# Altium footprint library SamacSys.PcbLib: 70 footprints (part 3 of 5)
Each footprint in its own frame and in the unit in brackets; x right, y up, seen from the top. Pads: shape width x height; smd on the part's side, far side on the other; paste and mask are expansions set on the pad; w line width, h text height; cw(c..) or ccw(c..) is an arc to the next point about the centre after c.
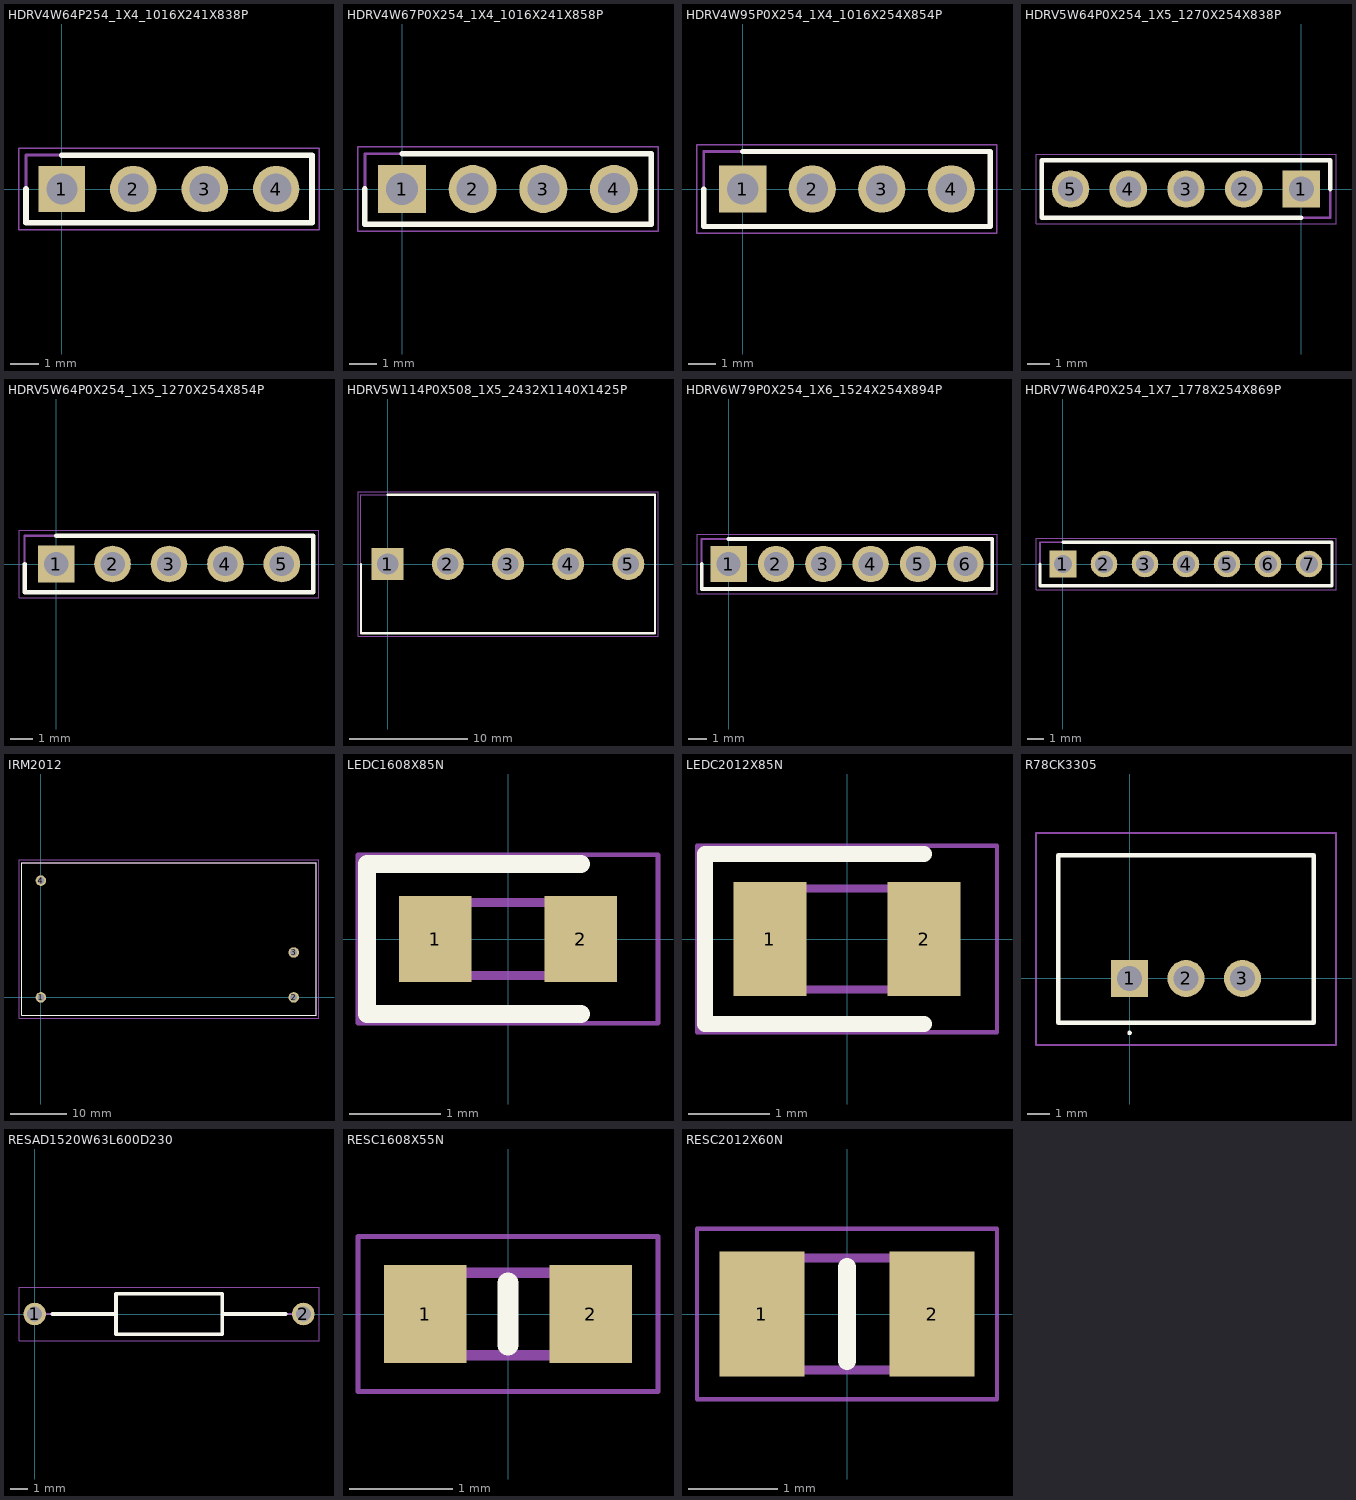
[diagram p2: the footprints below, top view; thin cyan lines are the x and y axes]

## HDRV4W64P254_1X4_1016X241X838P [mm]
pads (4):
  rect 1.65x1.65 hole 1.1: 1(0,0)
  round 1.65 hole 1.1: 2(2.54,0) 3(5.08,0) 4(7.62,0)
Top Overlay:
  lines w0.2: -1.27,0 -1.27,-1.205 8.89,-1.205 8.89,1.205 0,1.205
Mechanical 13:
  lines w0.1: -1.27,-1.205 8.89,-1.205 8.89,1.205 -1.27,1.205 -1.27,-1.205
Mechanical 15:
  lines w0.05: -1.52,-1.455 9.14,-1.455 9.14,1.455 -1.52,1.455 -1.52,-1.455
3D body "TSW-104-07-G-S-LL.stp": height 8.38, standoff -2.54, extent -1.27,-1.205 8.89,1.205

## HDRV4W67P0X254_1X4_1016X241X858P [mm]
pads (4):
  rect 1.725x1.725 hole 1.15: 1(0,0)
  round 1.725 hole 1.15: 2(2.54,0) 3(5.08,0) 4(7.62,0)
Top Overlay:
  lines w0.2: -1.335,0 -1.335,-1.27 8.955,-1.27 8.955,1.27 0,1.27
Mechanical 13:
  lines w0.1: -1.335,-1.27 8.955,-1.27 8.955,1.27 -1.335,1.27 -1.335,-1.27
Mechanical 15:
  lines w0.05: -1.585,-1.52 9.205,-1.52 9.205,1.52 -1.585,1.52 -1.585,-1.52
3D body "69190-404HLF.stp": height 8.58, standoff -3.3, extent -1.27,-1.205 8.89,1.205

## HDRV4W95P0X254_1X4_1016X254X854P [mm]
pads (4):
  rect 1.725x1.725 hole 1.15: 1(0,0)
  round 1.725 hole 1.15: 2(2.54,0) 3(5.08,0) 4(7.62,0)
Top Overlay:
  lines w0.2: -1.42,0 -1.42,-1.37 9.04,-1.37 9.04,1.37 0,1.37
Mechanical 13:
  lines w0.1: -1.42,-1.37 9.04,-1.37 9.04,1.37 -1.42,1.37 -1.42,-1.37
Mechanical 15:
  lines w0.05: -1.67,-1.62 9.29,-1.62 9.29,1.62 -1.67,1.62 -1.67,-1.62
3D body "61300411121.stp": height 8.54, standoff -3.2, extent -1.27,-1.27 8.89,1.27

## HDRV5W64P0X254_1X5_1270X254X838P [mm]
pads (5):
  rect 1.65x1.65 hole 1.1: 1(0,0)
  round 1.65 hole 1.1: 2(-2.54,0) 3(-5.08,0) 4(-7.62,0) 5(-10.16,0)
Top Overlay:
  lines w0.2: 0,-1.27 -11.43,-1.27 -11.43,1.27 1.27,1.27 1.27,0
Mechanical 13:
  lines w0.1: -11.43,-1.27 -11.43,1.27 1.27,1.27 1.27,-1.27 -11.43,-1.27
Mechanical 15:
  lines w0.05: -11.68,-1.52 -11.68,1.52 1.52,1.52 1.52,-1.52 -11.68,-1.52
3D body "TSW-105-07-G-S-LL.stp": height 8.38, standoff -2.54, extent -11.43,-1.27 1.27,1.27

## HDRV5W64P0X254_1X5_1270X254X854P [mm]
pads (5):
  rect 1.65x1.65 hole 1.1: 1(0,0)
  round 1.65 hole 1.1: 2(2.54,0) 3(5.08,0) 4(7.62,0) 5(10.16,0)
Top Overlay:
  lines w0.2: -1.42,0 -1.42,-1.27 11.58,-1.27 11.58,1.27 0,1.27
Mechanical 13:
  lines w0.1: -1.42,-1.27 11.58,-1.27 11.58,1.27 -1.42,1.27 -1.42,-1.27
Mechanical 15:
  lines w0.05: -1.67,-1.52 11.83,-1.52 11.83,1.52 -1.67,1.52 -1.67,-1.52
3D body "61300511121.stp": height 8.54, standoff -3, extent -1.27,-1.27 11.43,1.27

## HDRV5W114P0X508_1X5_2432X1140X1425P [mm]
pads (5):
  rect 2.7x2.7 hole 1.8: 1(0,0)
  round 2.7 hole 1.8: 2(5.08,0) 3(10.16,0) 4(15.24,0) 5(20.32,0)
Top Overlay:
  lines w0.2: -2.25,0 -2.25,-5.85 22.57,-5.85 22.57,5.85 0,5.85
Mechanical 13:
  lines w0.1: -2.25,-5.85 22.57,-5.85 22.57,5.85 -2.25,5.85 -2.25,-5.85
Mechanical 15:
  lines w0.05: -2.5,-6.1 22.82,-6.1 22.82,6.1 -2.5,6.1 -2.5,-6.1
3D body "10-32-1051.stp": height 13.8, standoff -3.65, extent -2,-5.7 22.32,5.7

## HDRV6W79P0X254_1X6_1524X254X894P [mm]
pads (6):
  rect 1.95x1.95 hole 1.3: 1(0,0)
  round 1.95 hole 1.3: 2(2.54,0) 3(5.08,0) 4(7.62,0) 5(10.16,0) 6(12.7,0)
Top Overlay:
  lines w0.2: -1.445,0 -1.445,-1.345 14.145,-1.345 14.145,1.345 0,1.345
Mechanical 13:
  lines w0.1: -1.445,-1.345 14.145,-1.345 14.145,1.345 -1.445,1.345 -1.445,-1.345
Mechanical 15:
  lines w0.05: -1.695,-1.595 14.395,-1.595 14.395,1.595 -1.695,1.595 -1.695,-1.595
3D body "61300611121.stp": height 8.54, standoff -3, extent -1.27,-1.27 13.97,1.27

## HDRV7W64P0X254_1X7_1778X254X869P [mm]
pads (7):
  rect 1.65x1.65 hole 1.1: 1(0,0)
  round 1.65 hole 1.1: 2(2.54,0) 3(5.08,0) 4(7.62,0) 5(10.16,0) 6(12.7,0) 7(15.24,0)
Top Overlay:
  lines w0.2: -1.42,0 -1.42,-1.345 16.66,-1.345 16.66,1.345 0,1.345
Mechanical 13:
  lines w0.1: -1.42,-1.345 16.66,-1.345 16.66,1.345 -1.42,1.345 -1.42,-1.345
Mechanical 15:
  lines w0.05: -1.67,-1.595 16.91,-1.595 16.91,1.595 -1.67,1.595 -1.67,-1.595
3D body "61300711121.stp": height 8.69, standoff -3.2, extent -1.27,-1.27 16.51,1.27

## IRM2012 [mm]
pads (4):
  round 1.86 hole 1.24: 1(0,0) 2(45,0) 3(45,8) 4(0,20.8)
Top Overlay:
  lines w0.1: -3.4,-3.2 -3.4,24 49,24 49,-3.2 -3.4,-3.2
Mechanical 13:
  lines w0.2: -3.4,-3.2 -3.4,24 49,24 49,-3.2 -3.4,-3.2
Mechanical 15:
  lines w0.1: -3.9,-3.7 -3.9,24.5 49.5,24.5 49.5,-3.7 -3.9,-3.7
3D body "IRM-20-12.stp": height 24, standoff -3.5, extent -3.42,-3.2 48.98,24

## LEDC1608X85N [mm]
pads (2):
  rect 0.8x0.95 smd: 1(-0.8,0) 2(0.8,0)
Top Overlay:
  lines w0.2: 0.8,-0.825 -1.55,-0.825 -1.55,0.825 0.8,0.825
Mechanical 13:
  lines w0.1: -0.8,0.133 -0.533,0.4 ; -0.8,-0.4 -0.8,0.4 0.8,0.4 0.8,-0.4 -0.8,-0.4
Mechanical 15:
  lines w0.05: -1.65,-0.925 -1.65,0.925 1.65,0.925 1.65,-0.925 -1.65,-0.925
3D body "APT1608SGC.stp": height 0.76, standoff 0, extent -0.8,-0.4 0.8,0.4

## LEDC2012X85N [mm]
pads (2):
  rect 0.9x1.4 smd: 1(-0.95,0) 2(0.95,0)
Top Overlay:
  lines w0.2: 0.95,-1.05 -1.75,-1.05 -1.75,1.05 0.95,1.05
Mechanical 13:
  lines w0.1: -1,0.208 -0.583,0.625 ; -1,-0.625 -1,0.625 1,0.625 1,-0.625 -1,-0.625
Mechanical 15:
  lines w0.05: -1.85,-1.15 -1.85,1.15 1.85,1.15 1.85,-1.15 -1.85,-1.15
3D body "APT2012SGC.stp": height 0.75, standoff 0, extent -1.03,-0.625 0.97,0.625

## PCBComponent_1 [mm]

## R78CK3305 [mm]
pads (3):
  rect 1.665x1.665 hole 1.11: 1(0,0)
  round 1.665 hole 1.11: 2(2.54,0) 3(5.08,0)
Top Overlay:
  lines w0.1: 0,-2.5 ccw(c0,-2.45) 0,-2.4 ccw(c0,-2.45) 0,-2.5
  lines w0.2: -3.21,-2 8.29,-2 8.29,5.55 -3.21,5.55 -3.21,-2
Mechanical 13:
  lines w0.1: -3.21,-2 -3.21,5.55 8.29,5.55 8.29,-2 -3.21,-2
Mechanical 15:
  lines w0.1: -4.21,-3 -4.21,6.55 9.29,6.55 9.29,-3 -4.21,-3
3D body "R-78CK3.3-0.5.stp": height 10.43, standoff -3.87, extent -3.21,-1.995 8.29,5.555

## RESAD1520W63L600D230 [mm]
pads (2):
  round 1.275 hole 0.85: 1(0,0) 2(15.2,0)
Top Overlay:
  lines w0.2: 0.988,0 4.6,0 ; 10.6,0 14.212,0 ; 4.6,-1.15 4.6,1.15 10.6,1.15 10.6,-1.15 4.6,-1.15
Mechanical 13:
  lines w0.1: 0,0 4.6,0 ; 10.6,0 15.2,0 ; 4.6,-1.15 4.6,1.15 10.6,1.15 10.6,-1.15 4.6,-1.15
Mechanical 15:
  lines w0.05: -0.888,-1.5 -0.888,1.5 16.087,1.5 16.087,-1.5 -0.888,-1.5
3D body "CF14JT1K00.stp": height 2.29, standoff 0.01, extent -23.4,-1.15 38.6,1.15

## RESC1608X55N [mm]
pads (2):
  rect 0.8x0.95 smd: 1(-0.8,0) 2(0.8,0)
Top Overlay:
  lines w0.2: 0,-0.3 0,0.3
Mechanical 13:
  lines w0.1: -0.8,-0.4 -0.8,0.4 0.8,0.4 0.8,-0.4 -0.8,-0.4
Mechanical 15:
  lines w0.05: -1.45,-0.75 -1.45,0.75 1.45,0.75 1.45,-0.75 -1.45,-0.75
3D body "RC0603FR-071KL.stp": height 0.55, standoff 0, extent -0.8,-0.4 0.8,0.4

## RESC2012X60N [mm]
pads (2):
  rect 0.95x1.4 smd: 1(-0.95,0) 2(0.95,0)
Top Overlay:
  lines w0.2: 0,-0.525 0,0.525
Mechanical 13:
  lines w0.1: -1,-0.625 -1,0.625 1,0.625 1,-0.625 -1,-0.625
Mechanical 15:
  lines w0.05: -1.675,-0.95 -1.675,0.95 1.675,0.95 1.675,-0.95 -1.675,-0.95
3D body "RC0805FR-071KL.stp": height 0.6, standoff 0, extent -1,-0.625 1,0.625